# Altium footprint library SamacSys.PcbLib: 1008 footprints (part 52 of 63)
Each footprint in its own frame and in the unit in brackets; x right, y up, seen from the top. Pads: shape width x height; smd on the part's side, far side on the other; paste and mask are expansions set on the pad; w line width, h text height; cw(c..) or ccw(c..) is an arc to the next point about the centre after c.
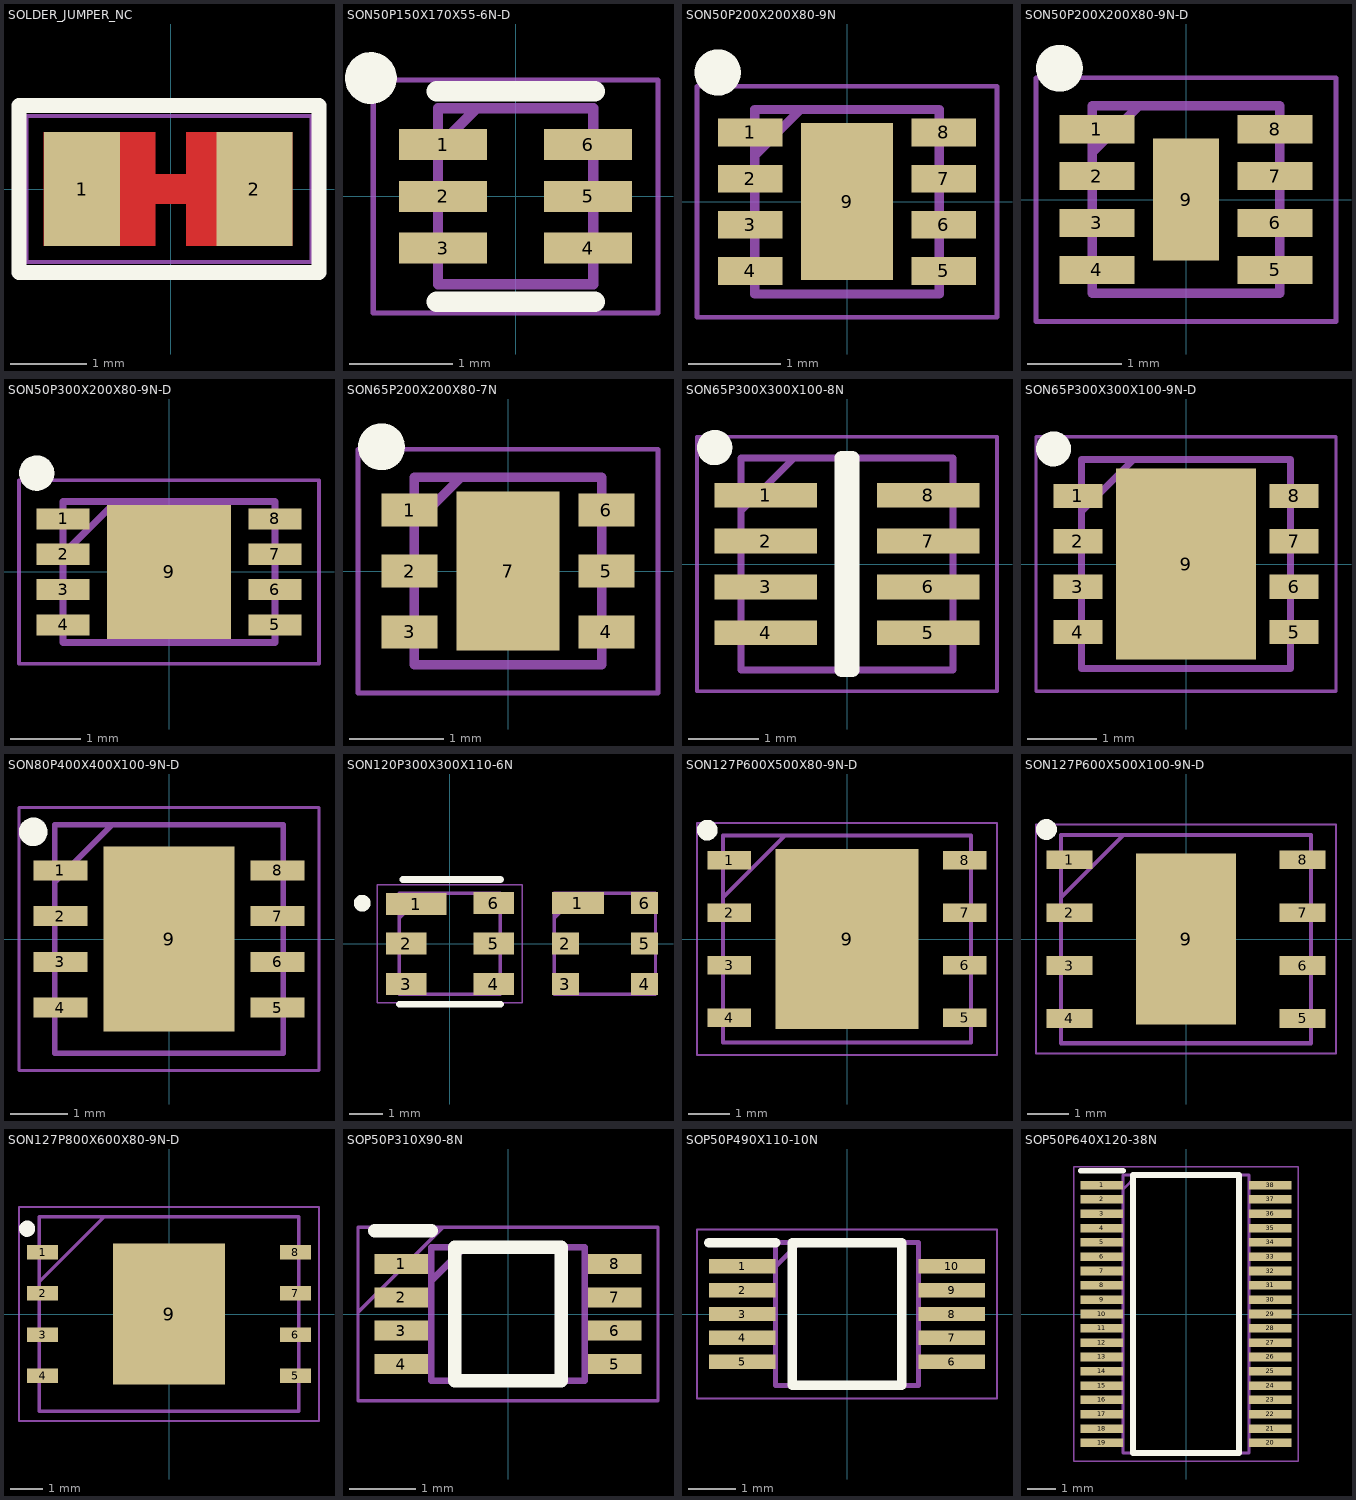
[diagram p51: the footprints below, top view; thin cyan lines are the x and y axes]

## SOLDER_JUMPER_NC [mm]
pads (2):
  rect 1x1.5 smd: 1(-1.17,0) 2(1.1,0)
Top Layer:
  rectangle: -0.4,-0.2 0.4,0.2
  rectangle: -1.675,-0.75 -0.2,0.75
  region: 1.6,0.75 0.2,0.75 0.2,-0.75 1.6,-0.75
Top Overlay:
  lines w0.2: -2,-1.1 1.95,-1.1 1.95,1.1 -2,1.1 -2,-1.1
Top Solder:
  rectangle: -1.775,-0.85 1.7,0.85
Assembly:
  lines w0.1: -1.2,-0.625 -1.2,0.625 ; 0.8,-0.625 0.8,0.625
Countryard:
  lines w0.05: -1.9,-0.96 1.85,-0.96 1.85,0.96 -1.9,0.96 -1.9,-0.96

## SON50P150X170X55-6N-D [mm]
pads (6):
  rect 0.85x0.3 smd: 1(-0.7,0.5) 2(-0.7,0) 3(-0.7,-0.5) 4(0.7,-0.5) 5(0.7,0) 6(0.7,0.5)
Top Overlay:
  circle w0.25: c-1.397,1.143 r0.125
  lines w0.2: -0.762,-1.016 0.762,-1.016 ; -0.762,1.016 0.762,1.016
Assembly:
  lines w0.1: -0.75,0.475 -0.375,0.85 ; -0.75,-0.85 -0.75,0.85 0.75,0.85 0.75,-0.85 -0.75,-0.85
Countryard:
  lines w0.05: -1.375,-1.125 -1.375,1.125 1.375,1.125 1.375,-1.125 -1.375,-1.125
3D body "ECMF02-2AMX6.stp": height 0.55, standoff 0, extent -0.8,-0.85 0.8,0.85

## SON50P200X200X80-9N [mm]
pads (9):
  rect 0.7x0.3 smd: 1(-1.05,0.75) 2(-1.05,0.25) 3(-1.05,-0.25) 4(-1.05,-0.75) 5(1.05,-0.75) 6(1.05,-0.25) 7(1.05,0.25) 8(1.05,0.75)
  rect 1x1.7 smd: 9(0,0)
Top Overlay:
  circle w0.25: c-1.4,1.4 r0.125
Assembly:
  lines w0.1: -1,0.5 -0.5,1 ; -1,-1 -1,1 1,1 1,-1 -1,-1
Countryard:
  lines w0.05: -1.625,-1.25 -1.625,1.25 1.625,1.25 1.625,-1.25 -1.625,-1.25
3D body "NCV6323BMTAATBG.stp": height 0.8, standoff 0, extent -1.05,-1 1.05,1

## SON50P200X200X80-9N-D [mm]
pads (9):
  rect 0.8x0.3 smd: 1(-0.95,0.75) 2(-0.95,0.25) 3(-0.95,-0.25) 4(-0.95,-0.75) 5(0.95,-0.75) 6(0.95,-0.25) 7(0.95,0.25) 8(0.95,0.75)
  rect 0.7x1.3 smd: 9(0,0)
Top Overlay:
  circle w0.25: c-1.35,1.4 r0.125
Assembly:
  lines w0.1: -1,0.5 -0.5,1 ; -1,-1 -1,1 1,1 1,-1 -1,-1
Countryard:
  lines w0.05: -1.6,-1.3 -1.6,1.3 1.6,1.3 1.6,-1.3 -1.6,-1.3
3D body "SGM3209YTDE8G_TR.stp": height 0.8, standoff 0, extent -1.05,-1 1.05,1

## SON50P300X200X80-9N-D [mm]
pads (9):
  rect 0.75x0.3 smd: 1(-1.5,0.75) 2(-1.5,0.25) 3(-1.5,-0.25) 4(-1.5,-0.75) 5(1.5,-0.75) 6(1.5,-0.25) 7(1.5,0.25) 8(1.5,0.75)
  rect 1.75x1.9 smd: 9(0,0)
Top Overlay:
  circle w0.25: c-1.875,1.4 r0.125
Assembly:
  lines w0.1: -1.5,0.25 -0.75,1 ; -1.5,-1 -1.5,1 1.5,1 1.5,-1 -1.5,-1
Countryard:
  lines w0.05: -2.125,-1.3 -2.125,1.3 2.125,1.3 2.125,-1.3 -2.125,-1.3
3D body "TMUX6201RQXR.stp": height 0.8, standoff 0, extent -1.55,-1 1.55,1

## SON65P200X200X80-7N [mm]
pads (7):
  rect 0.6x0.35 smd: 1(-1.05,0.65) 2(-1.05,0) 3(-1.05,-0.65) 4(1.05,-0.65) 5(1.05,0) 6(1.05,0.65)
  rect 1.1x1.7 smd: 7(0,0)
Top Overlay:
  circle w0.25: c-1.35,1.325 r0.125
Assembly:
  lines w0.1: -1,0.5 -0.5,1 ; -1,-1 1,-1 1,1 -1,1 -1,-1
Countryard:
  lines w0.05: -1.6,-1.3 1.6,-1.3 1.6,1.3 -1.6,1.3 -1.6,-1.3
3D body "TPS74501PDRVR.stp": height 0.8, standoff 0, extent -1.05,-1 1.05,1

## SON65P300X300X100-8N [mm]
pads (8):
  rect 1.45x0.35 smd: 1(-1.15,0.975) 2(-1.15,0.325) 3(-1.15,-0.325) 4(-1.15,-0.975) 5(1.15,-0.975) 6(1.15,-0.325) 7(1.15,0.325) 8(1.15,0.975)
Top Overlay:
  circle w0.25: c-1.875,1.65 r0.125
  lines w0.2: -0.075,-1.5 -0.075,1.5 0.075,1.5 0.075,-1.5 -0.075,-1.5
Assembly:
  lines w0.1: -1.5,0.75 -0.75,1.5 ; -1.5,-1.5 -1.5,1.5 1.5,1.5 1.5,-1.5 -1.5,-1.5
Countryard:
  lines w0.05: -2.125,-1.8 -2.125,1.8 2.125,1.8 2.125,-1.8 -2.125,-1.8
3D body "MP9943GQ-P.stp": height 1, standoff 0, extent -1.55,-1.5 1.55,1.5

## SON65P300X300X100-9N-D [mm]
pads (9):
  rect 0.7x0.35 smd: 1(-1.55,0.975) 2(-1.55,0.325) 3(-1.55,-0.325) 4(-1.55,-0.975) 5(1.55,-0.975) 6(1.55,-0.325) 7(1.55,0.325) 8(1.55,0.975)
  rect 2x2.74 smd: 9(0,0)
Top Overlay:
  circle w0.25: c-1.9,1.65 r0.125
Assembly:
  lines w0.1: -1.5,0.75 -0.75,1.5 ; -1.5,-1.5 1.5,-1.5 1.5,1.5 -1.5,1.5 -1.5,-1.5
Countryard:
  lines w0.05: -2.15,-1.825 2.15,-1.825 2.15,1.825 -2.15,1.825 -2.15,-1.825
3D body "STLD40DPMR.stp": height 1, standoff 0, extent -1.55,-1.5 1.55,1.5

## SON80P400X400X100-9N-D [mm]
pads (9):
  rect 0.95x0.35 smd: 1(-1.9,1.2) 2(-1.9,0.4) 3(-1.9,-0.4) 4(-1.9,-1.2) 5(1.9,-1.2) 6(1.9,-0.4) 7(1.9,0.4) 8(1.9,1.2)
  rect 2.3x3.23 smd: 9(0,0)
Top Overlay:
  circle w0.25: c-2.375,1.875 r0.125
Assembly:
  lines w0.1: -2,1 -1,2 ; -2,-2 -2,2 2,2 2,-2 -2,-2
Countryard:
  lines w0.05: -2.625,-2.3 -2.625,2.3 2.625,2.3 2.625,-2.3 -2.625,-2.3
3D body "ST1S10PUR.stp": height 1, standoff 0, extent -2.05,-2 2.05,2

## SON120P300X300X110-6N [mm]
pads (12):
  rect 1.8x0.65 smd: 1(-1,1.175)
  rect 1.55x0.65 smd: 1(3.8,1.2)
  rect 1.2x0.65 smd: 2(-1.3,0) 3(-1.3,-1.2) 4(1.3,-1.2) 5(1.3,0) 6(1.3,1.2)
  rect 0.8x0.65 smd: 2(3.425,0) 3(3.425,-1.2) 4(5.775,-1.2) 5(5.775,0) 6(5.775,1.2)
Top Overlay:
  circle w0.25: c-2.6,1.2 r0.125
  lines w0.2: -1.5,-1.8 1.5,-1.8 ; -1.4,1.9 1.5,1.9
Assembly:
  lines w0.1: -1.5,0.75 -0.75,1.5 ; 3.1,0.75 3.85,1.5 ; -1.5,-1.5 -1.5,1.5 1.5,1.5 1.5,-1.5 -1.5,-1.5 ; 3.1,-1.5 3.1,1.5 6.1,1.5 6.1,-1.5 3.1,-1.5
Countryard:
  lines w0.05: -2.15,-1.75 -2.15,1.75 2.15,1.75 2.15,-1.75 -2.15,-1.75
3D body "B39871B3717U410.stp": height 1.1, standoff 0, extent -1.55,-1.5 1.55,1.5
3D body "B39871B3717U410.stp": height 1.1, standoff 0, extent 3.05,-1.5 6.15,1.5

## SON127P600X500X80-9N-D [mm]
pads (9):
  rect 1.05x0.45 smd: 1(-2.85,1.905) 2(-2.85,0.635) 3(-2.85,-0.635) 4(-2.85,-1.905) 5(2.85,-1.905) 6(2.85,-0.635) 7(2.85,0.635) 8(2.85,1.905)
  rect 3.45x4.35 smd: 9(0,0)
Top Overlay:
  circle w0.25: c-3.375,2.63 r0.125
Assembly:
  lines w0.1: -3,1 -1.5,2.5 ; -3,-2.5 -3,2.5 3,2.5 3,-2.5 -3,-2.5
Countryard:
  lines w0.05: -3.625,-2.8 -3.625,2.8 3.625,2.8 3.625,-2.8 -3.625,-2.8
3D body "W25Q64JVZPIQ_TR.stp": height 0.8, standoff 0, extent -3.05,-2.5 3.05,2.5

## SON127P600X500X100-9N-D [mm]
pads (9):
  rect 1.1x0.45 smd: 1(-2.8,1.905) 2(-2.8,0.635) 3(-2.8,-0.635) 4(-2.8,-1.905) 5(2.8,-1.905) 6(2.8,-0.635) 7(2.8,0.635) 8(2.8,1.905)
  rect 2.4x4.1 smd: 9(0,0)
Top Overlay:
  circle w0.25: c-3.35,2.63 r0.125
Assembly:
  lines w0.1: -3,1 -1.5,2.5 ; -3,-2.5 -3,2.5 3,2.5 3,-2.5 -3,-2.5
Countryard:
  lines w0.05: -3.6,-2.75 -3.6,2.75 3.6,2.75 3.6,-2.75 -3.6,-2.75
3D body "24LC512-I_MF.stp": height 1, standoff 0, extent -3.05,-2.5 3.05,2.5

## SON127P800X600X80-9N-D [mm]
pads (9):
  rect 0.95x0.45 smd: 1(-3.9,1.905) 2(-3.9,0.635) 3(-3.9,-0.635) 4(-3.9,-1.905) 5(3.9,-1.905) 6(3.9,-0.635) 7(3.9,0.635) 8(3.9,1.905)
  rect 3.45x4.35 smd: 9(0,0)
Top Overlay:
  circle w0.25: c-4.375,2.63 r0.125
Assembly:
  lines w0.1: -4,1 -2,3 ; -4,-3 4,-3 4,3 -4,3 -4,-3
Countryard:
  lines w0.05: -4.625,-3.3 4.625,-3.3 4.625,3.3 -4.625,3.3 -4.625,-3.3
3D body "W25N04KVZEIR.stp": height 0.8, standoff 0, extent -4.05,-3 4.05,3

## SOP50P310X90-8N [mm]
pads (8):
  rect 0.8x0.3 smd: 1(-1.6,0.75) 2(-1.6,0.25) 3(-1.6,-0.25) 4(-1.6,-0.75) 5(1.6,-0.75) 6(1.6,-0.25) 7(1.6,0.25) 8(1.6,0.75)
Top Overlay:
  lines w0.2: -2,1.25 -1.15,1.25 ; -0.8,-1 0.8,-1 0.8,1 -0.8,1 -0.8,-1
Top Courtyard:
  lines w0.05: -2.25,-0.025 -2.25,0.025 -0.975,1.3 ; -0.95,1.3 -0.5,1.3
Assembly:
  lines w0.1: -1.15,0.5 -0.65,1 ; -1.15,-1 1.15,-1 1.15,1 -1.15,1 -1.15,-1
Countryard:
  lines w0.05: -2.25,-1.3 2.25,-1.3 2.25,1.3 -2.25,1.3 -2.25,-1.3
3D body "NC7WV125K8X.stp": height 0.9, standoff 0, extent -1.55,-1 1.55,1

## SOP50P490X110-10N [mm]
pads (10):
  rect 1.4x0.3 smd: 1(-2.2,1) 2(-2.2,0.5) 3(-2.2,0) 4(-2.2,-0.5) 5(-2.2,-1) 6(2.2,-1) 7(2.2,-0.5) 8(2.2,0) 9(2.2,0.5) 10(2.2,1)
Top Overlay:
  lines w0.2: -2.9,1.5 -1.5,1.5 ; -1.15,-1.5 1.15,-1.5 1.15,1.5 -1.15,1.5 -1.15,-1.5
Assembly:
  lines w0.1: -1.5,1 -1,1.5 ; -1.5,-1.5 1.5,-1.5 1.5,1.5 -1.5,1.5 -1.5,-1.5
Countryard:
  lines w0.05: -3.15,-1.775 3.15,-1.775 3.15,1.775 -3.15,1.775 -3.15,-1.775
3D body "MAX9924UAUB+.stp": height 1.1, standoff 0, extent -2.45,-1.5 2.45,1.5

## SOP50P640X120-38N [mm]
pads (38):
  rect 1.475x0.3 smd: 1(-2.938,4.5) 2(-2.938,4) 3(-2.938,3.5) 4(-2.938,3) 5(-2.938,2.5) 6(-2.938,2) 7(-2.938,1.5) 8(-2.938,1) 9(-2.938,0.5) 10(-2.938,0) 11(-2.938,-0.5) 12(-2.938,-1) 13(-2.938,-1.5) 14(-2.938,-2) 15(-2.938,-2.5) 16(-2.938,-3) 17(-2.938,-3.5) 18(-2.938,-4) 19(-2.938,-4.5) 20(2.938,-4.5) 21(2.938,-4) 22(2.938,-3.5) 23(2.938,-3) 24(2.938,-2.5) 25(2.938,-2) 26(2.938,-1.5) 27(2.938,-1) 28(2.938,-0.5) 29(2.938,0) 30(2.938,0.5) 31(2.938,1) 32(2.938,1.5) 33(2.938,2) 34(2.938,2.5) 35(2.938,3) 36(2.938,3.5) 37(2.938,4) 38(2.938,4.5)
Top Overlay:
  lines w0.2: -3.675,5 -2.2,5 ; -1.85,-4.85 -1.85,4.85 1.85,4.85 1.85,-4.85 -1.85,-4.85
Assembly:
  lines w0.1: -2.2,4.35 -1.7,4.85 ; -2.2,-4.85 -2.2,4.85 2.2,4.85 2.2,-4.85 -2.2,-4.85
Countryard:
  lines w0.05: -3.925,-5.15 -3.925,5.15 3.925,5.15 3.925,-5.15 -3.925,-5.15
3D body "CM2020-01TR.stp": height 1.2, standoff 0, extent -3.2,-4.85 3.2,4.85